# Altium footprint library WR-RAST.PcbLib: 73 footprints (part 4 of 5)
Each footprint in its own frame and in the unit in brackets; x right, y up, seen from the top. Pads: shape width x height; smd on the part's side, far side on the other; paste and mask are expansions set on the pad; w line width, h text height; cw(c..) or ccw(c..) is an arc to the next point about the centre after c.
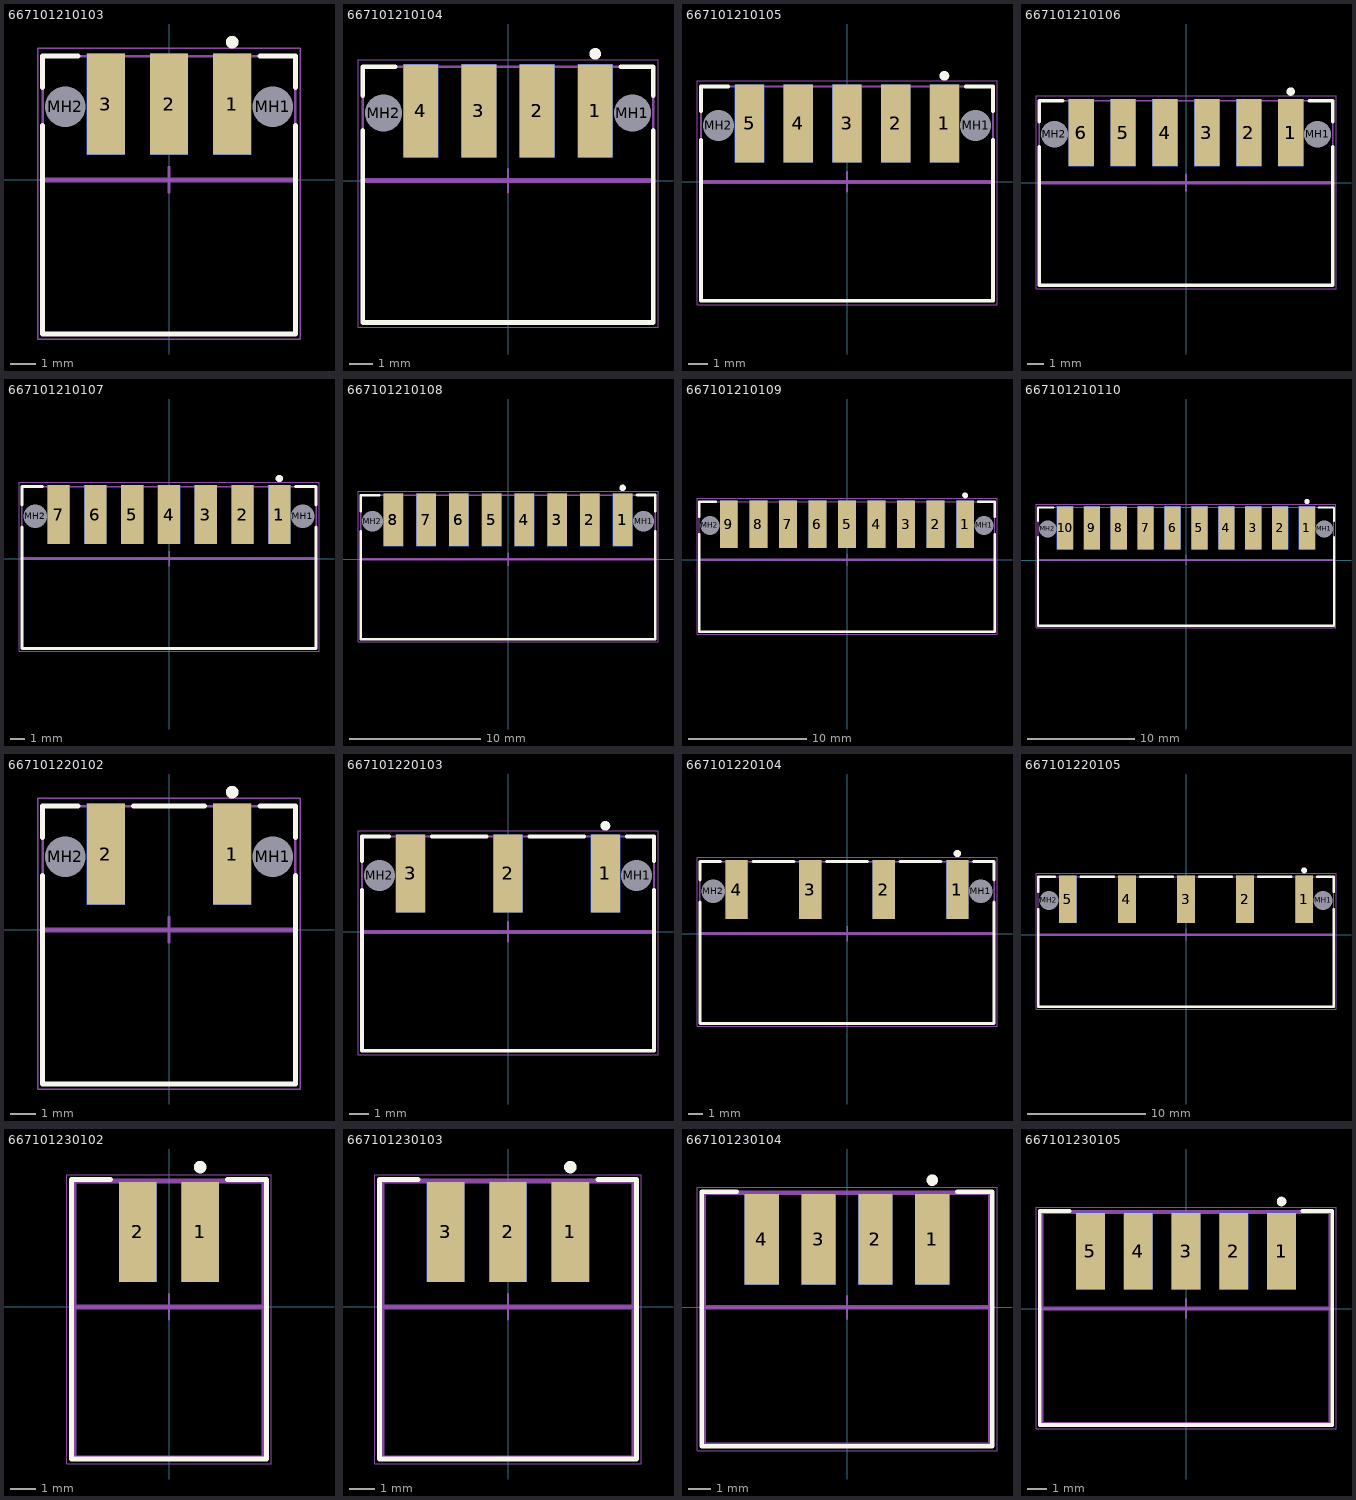
[diagram p3: the footprints below, top view; thin cyan lines are the x and y axes]

## 667101210103 [mm] "RAST Housing 2.5mm Pitch for Direct or Indirect Mating with lockign features, 3p"
height 7.35
pads (8):
  rect 1.5x4 smd: 1(2.5,3) 2(0,3) 3(-2.5,3)
  rect 1.5x4 smd far side: 1(2.5,3) 2(0,3) 3(-2.5,3)
  round 1.5 hole 1.6 unplated: MH1(4.1,2.9) MH2(-4.1,2.9)
Top Overlay:
  circle w0.25: c2.5,5.45 r0.125
  lines w0.2: -5,2.15 -5,-6.1 5,-6.1 5,2.15 ; -5,3.65 -5,4.9 -3.6,4.9 ; 3.6,4.9 5,4.9 5,3.65
Assembly Notes:
  lines w0.2: -5,0 5,0
  text "PCB Edge" at -2.443,-1.378 h1.2
Top Assembly:
  lines w0.1: -5,-6.1 -5,4.9 5,4.9 5,-6.1 -5,-6.1
Top Designator:
  text ".Designator" at -3.647,-0.357 h1
Top 3D Body:
  lines w0.1: -5,-6.1 -5,4.9 5,4.9 5,-6.1 -5,-6.1
Top Courtyard:
  lines w0.05: -5.2,-6.3 5.2,-6.3 5.2,5.2 -5.2,5.2 -5.2,-6.3
Top Component Center:
  lines w0.1: -0.5,0 0.5,0 ; 0,-0.5 0,0.5
3D body "667101210103.stp": height 3.17, standoff -4.17, extent -5,-6.1 5,4.9

## 667101210104 [mm] "RAST Housing 2.5mm Pitch for Direct or Indirect Mating with lockign features, 4p"
height 7.35
pads (10):
  rect 1.5x4 smd: 1(3.75,3) 2(1.25,3) 3(-1.25,3) 4(-3.75,3)
  rect 1.5x4 smd far side: 1(3.75,3) 2(1.25,3) 3(-1.25,3) 4(-3.75,3)
  round 1.5 hole 1.6 unplated: MH1(5.35,2.9) MH2(-5.35,2.9)
Top Overlay:
  circle w0.25: c3.75,5.45 r0.125
  lines w0.2: -6.25,2.15 -6.25,-6.1 6.25,-6.1 6.25,2.15 ; -6.25,3.65 -6.25,4.9 -4.85,4.9 ; 4.85,4.9 6.25,4.9 6.25,3.65
Assembly Notes:
  lines w0.2: -6.25,0 6.25,0
  text "PCB Edge" at -2.443,-1.378 h1.2
Top Assembly:
  lines w0.1: -6.25,-6.1 6.25,-6.1 6.25,4.9 -6.25,4.9 -6.25,-6.1
Top Designator:
  text ".Designator" at -3.647,-0.357 h1
Top 3D Body:
  lines w0.1: -6.25,-6.1 6.25,-6.1 6.25,4.9 -6.25,4.9 -6.25,-6.1
Top Courtyard:
  lines w0.05: -6.45,-6.3 -6.45,5.2 6.45,5.2 6.45,-6.3 -6.45,-6.3
Top Component Center:
  lines w0.1: -0.5,0 0.5,0 ; 0,-0.5 0,0.5
3D body "667101210104.stp": height 3.17, standoff -4.17, extent -6.25,-6.1 6.25,4.9

## 667101210105 [mm] "RAST Housing 2.5mm Pitch for Direct or Indirect Mating with lockign features, 5p"
height 7.35
pads (12):
  rect 1.5x4 smd: 1(5,3) 2(2.5,3) 3(0,3) 4(-2.5,3) 5(-5,3)
  rect 1.5x4 smd far side: 1(5,3) 2(2.5,3) 3(0,3) 4(-2.5,3) 5(-5,3)
  round 1.5 hole 1.6 unplated: MH1(6.6,2.9) MH2(-6.6,2.9)
Top Overlay:
  circle w0.25: c5,5.45 r0.125
  lines w0.2: -7.5,2.15 -7.5,-6.1 7.5,-6.1 7.5,2.15 ; -7.5,3.65 -7.5,4.9 -6.1,4.9 ; 6.1,4.9 7.5,4.9 7.5,3.65
Assembly Notes:
  lines w0.2: -7.5,0 7.5,0
  text "PCB Edge" at -2.443,-1.378 h1.2
Top Assembly:
  lines w0.1: 7.5,-6.1 -7.5,-6.1 -7.5,4.9 7.5,4.9 ; 7.5,-6.1 7.5,4.9
Top Designator:
  text ".Designator" at -3.647,-0.357 h1
Top 3D Body:
  lines w0.1: 7.5,-6.1 -7.5,-6.1 -7.5,4.9 7.5,4.9 ; 7.5,-6.1 7.5,4.9
Top Courtyard:
  lines w0.05: -7.7,-6.3 7.7,-6.3 7.7,5.2 -7.7,5.2 -7.7,-6.3
Top Component Center:
  lines w0.1: -0.5,0 0.5,0 ; 0,-0.5 0,0.5
3D body "667101210105.stp": height 3.17, standoff -4.17, extent -7.5,-6.1 7.5,4.9

## 667101210106 [mm] "RAST Housing 2.5mm Pitch for Direct or Indirect Mating with lockign features, 6p"
height 7.35
pads (14):
  rect 1.5x4 smd: 1(6.25,3) 2(3.75,3) 3(1.25,3) 4(-1.25,3) 5(-3.75,3) 6(-6.25,3)
  rect 1.5x4 smd far side: 1(6.25,3) 2(3.75,3) 3(1.25,3) 4(-1.25,3) 5(-3.75,3) 6(-6.25,3)
  round 1.5 hole 1.6 unplated: MH1(7.85,2.9) MH2(-7.85,2.9)
Top Overlay:
  circle w0.25: c6.25,5.45 r0.125
  lines w0.2: -8.75,2.15 -8.75,-6.1 8.75,-6.1 8.75,2.15 ; -8.75,3.65 -8.75,4.9 -7.35,4.9 ; 7.35,4.9 8.75,4.9 8.75,3.65
Assembly Notes:
  lines w0.2: -8.75,0 8.75,0
  text "PCB Edge" at -2.443,-1.378 h1.2
Top Assembly:
  lines w0.1: -8.75,-6.1 -8.75,4.9 8.75,4.9 8.75,-6.1 -8.75,-6.1
Top Designator:
  text ".Designator" at -3.647,-0.357 h1
Top 3D Body:
  lines w0.1: -8.75,-6.1 -8.75,4.9 8.75,4.9 8.75,-6.1 -8.75,-6.1
Top Courtyard:
  lines w0.05: -8.95,-6.3 8.95,-6.3 8.95,5.2 -8.95,5.2 -8.95,-6.3
Top Component Center:
  lines w0.1: -0.5,0 0.5,0 ; 0,-0.5 0,0.5
3D body "667101210106.stp": height 3.42, standoff -3.92, extent -8.75,-6.1 8.75,4.9

## 667101210107 [mm] "RAST Housing 2.5mm Pitch for Direct or Indirect Mating with lockign features, 7p"
height 7.35
pads (16):
  rect 1.5x4 smd: 1(7.5,3) 2(5,3) 3(2.5,3) 4(0,3) 5(-2.5,3) 6(-5,3) 7(-7.5,3)
  rect 1.5x4 smd far side: 1(7.5,3) 2(5,3) 3(2.5,3) 4(0,3) 5(-2.5,3) 6(-5,3) 7(-7.5,3)
  round 1.5 hole 1.6 unplated: MH1(9.1,2.9) MH2(-9.1,2.9)
Top Overlay:
  circle w0.25: c7.5,5.45 r0.125
  lines w0.2: -10,2.15 -10,-6.1 10,-6.1 10,2.15 ; -10,3.65 -10,4.9 -8.6,4.9 ; 8.6,4.9 10,4.9 10,3.65
Assembly Notes:
  lines w0.2: -10,0 10,0
  text "PCB Edge" at -2.443,-1.378 h1.2
Top Assembly:
  lines w0.1: -10,-6.1 10,-6.1 10,4.9 -10,4.9 -10,-6.1
Top Designator:
  text ".Designator" at -3.647,-0.357 h1
Top 3D Body:
  lines w0.1: -10,-6.1 10,-6.1 10,4.9 -10,4.9 -10,-6.1
Top Courtyard:
  lines w0.05: -10.2,-6.3 -10.2,5.2 10.2,5.2 10.2,-6.3 -10.2,-6.3
Top Component Center:
  lines w0.1: -0.5,0 0.5,0 ; 0,-0.5 0,0.5
3D body "667101210107.stp": height 3.42, standoff -3.92, extent -10,-6.1 10,4.9

## 667101210108 [mm] "RAST Housing 2.5mm Pitch for Direct or Indirect Mating with lockign features, 8p"
height 7.35
pads (18):
  rect 1.5x4 smd: 1(8.75,3) 2(6.25,3) 3(3.75,3) 4(1.25,3) 5(-1.25,3) 6(-3.75,3) 7(-6.25,3) 8(-8.75,3)
  rect 1.5x4 smd far side: 1(8.75,3) 2(6.25,3) 3(3.75,3) 4(1.25,3) 5(-1.25,3) 6(-3.75,3) 7(-6.25,3) 8(-8.75,3)
  round 1.5 hole 1.6 unplated: MH1(10.35,2.9) MH2(-10.35,2.9)
Top Overlay:
  circle w0.25: c8.75,5.45 r0.125
  lines w0.2: -11.25,2.15 -11.25,-6.1 11.25,-6.1 11.25,2.15 ; -11.25,3.65 -11.25,4.9 -9.85,4.9 ; 9.85,4.9 11.25,4.9 11.25,3.65
Assembly Notes:
  lines w0.2: -11.25,0 11.25,0
  text "PCB Edge" at -2.443,-1.378 h1.2
Top Assembly:
  lines w0.1: -11.25,-6.1 11.25,-6.1 11.25,4.9 -11.25,4.9 -11.25,-6.1
Top Designator:
  text ".Designator" at -3.647,-0.357 h1
Top 3D Body:
  lines w0.1: -11.25,-6.1 11.25,-6.1 11.25,4.9 -11.25,4.9 -11.25,-6.1
Top Courtyard:
  lines w0.05: -11.45,-6.3 -11.45,5.2 11.45,5.2 11.45,-6.3 -11.45,-6.3
Top Component Center:
  lines w0.1: -0.5,0 0.5,0 ; 0,-0.5 0,0.5
3D body "667101210108.stp": height 3.42, standoff -3.92, extent -11.25,-6.1 11.25,4.9

## 667101210109 [mm] "RAST Housing 2.5mm Pitch for Direct or Indirect Mating with lockign features, 9p"
height 7.35
pads (20):
  rect 1.5x4 smd: 1(10,3) 2(7.5,3) 3(5,3) 4(2.5,3) 5(0,3) 6(-2.5,3) 7(-5,3) 8(-7.5,3) 9(-10,3)
  rect 1.5x4 smd far side: 1(10,3) 2(7.5,3) 3(5,3) 4(2.5,3) 5(0,3) 6(-2.5,3) 7(-5,3) 8(-7.5,3) 9(-10,3)
  round 1.5 hole 1.6 unplated: MH1(11.6,2.9) MH2(-11.6,2.9)
Top Overlay:
  circle w0.25: c10,5.45 r0.125
  lines w0.2: -12.5,2.15 -12.5,-6.1 12.5,-6.1 12.5,2.15 ; -12.5,3.65 -12.5,4.9 -11.1,4.9 ; 11.1,4.9 12.5,4.9 12.5,3.65
Assembly Notes:
  lines w0.2: -12.5,0 12.5,0
  text "PCB Edge" at -2.443,-1.378 h1.2
Top Assembly:
  lines w0.1: 12.5,-6.1 -12.5,-6.1 -12.5,4.9 12.5,4.9 ; 12.5,-6.1 12.5,4.9
Top Designator:
  text ".Designator" at -3.647,-0.357 h1
Top 3D Body:
  lines w0.1: 12.5,-6.1 -12.5,-6.1 -12.5,4.9 12.5,4.9 ; 12.5,-6.1 12.5,4.9
Top Courtyard:
  lines w0.05: -12.7,-6.3 12.7,-6.3 12.7,5.2 -12.7,5.2 -12.7,-6.3
Top Component Center:
  lines w0.1: -0.5,0 0.5,0 ; 0,-0.5 0,0.5
3D body "667101210109.stp": height 3.42, standoff -3.92, extent -12.5,-6.1 12.5,4.9

## 667101210110 [mm] "RAST Housing 2.5mm Pitch for Direct or Indirect Mating with lockign features, 10p"
height 7.35
pads (22):
  rect 1.5x4 smd: 1(11.25,3) 2(8.75,3) 3(6.25,3) 4(3.75,3) 5(1.25,3) 6(-1.25,3) 7(-3.75,3) 8(-6.25,3) 9(-8.75,3) 10(-11.25,3)
  rect 1.5x4 smd far side: 1(11.25,3) 2(8.75,3) 3(6.25,3) 4(3.75,3) 5(1.25,3) 6(-1.25,3) 7(-3.75,3) 8(-6.25,3) 9(-8.75,3) 10(-11.25,3)
  round 1.5 hole 1.6 unplated: MH1(12.85,2.9) MH2(-12.85,2.9)
Top Overlay:
  circle w0.25: c11.25,5.45 r0.125
  lines w0.2: -13.75,2.15 -13.75,-6.1 13.75,-6.1 13.75,2.15 ; -13.75,3.65 -13.75,4.9 -12.35,4.9 ; 12.35,4.9 13.75,4.9 13.75,3.65
Assembly Notes:
  lines w0.2: -13.75,0 13.75,0
  text "PCB Edge" at -2.443,-1.378 h1.2
Top Assembly:
  lines w0.1: -13.75,-6.1 -13.75,4.9 13.75,4.9 13.75,-6.1 -13.75,-6.1
Top Designator:
  text ".Designator" at -3.647,-0.357 h1
Top 3D Body:
  lines w0.1: -13.75,-6.1 -13.75,4.9 13.75,4.9 13.75,-6.1 -13.75,-6.1
Top Courtyard:
  lines w0.05: -13.95,-6.3 13.95,-6.3 13.95,5.2 -13.95,5.2 -13.95,-6.3
Top Component Center:
  lines w0.1: -0.5,0 0.5,0 ; 0,-0.5 0,0.5
3D body "667101210110.stp": height 3.42, standoff -3.92, extent -13.75,-6.1 13.75,4.9

## 667101220102 [mm] "RAST Housing 5mm Pitch for Direct or Indirect Mating with lockign features, 2p"
height 7.35
pads (6):
  rect 1.5x4 smd: 1(2.5,3) 2(-2.5,3)
  rect 1.5x4 smd far side: 1(2.5,3) 2(-2.5,3)
  round 1.5 hole 1.6 unplated: MH1(4.1,2.9) MH2(-4.1,2.9)
Top Overlay:
  circle w0.25: c2.5,5.45 r0.125
  lines w0.2: -5,2.15 -5,-6.1 5,-6.1 5,2.15 ; -5,3.65 -5,4.9 -3.6,4.9 ; -1.4,4.9 1.4,4.9 ; 3.6,4.9 5,4.9 5,3.65
Assembly Notes:
  lines w0.2: -5,0 5,0
  text "PCB Edge" at -2.443,-1.378 h1.2
Top Assembly:
  lines w0.1: -5,-6.1 5,-6.1 5,4.9 -5,4.9 -5,-6.1
Top Designator:
  text ".Designator" at -3.647,-0.357 h1
Top 3D Body:
  lines w0.1: -5,-6.1 5,-6.1 5,4.9 -5,4.9 -5,-6.1
Top Courtyard:
  lines w0.05: -5.2,-6.3 -5.2,5.2 5.2,5.2 5.2,-6.3 -5.2,-6.3
Top Component Center:
  lines w0.1: -0.5,0 0.5,0 ; 0,-0.5 0,0.5
3D body "667101220102.stp": height 3.42, standoff -3.92, extent -5,-6.1 5,4.9

## 667101220103 [mm] "RAST Housing 5mm Pitch for Direct or Indirect Mating with lockign features, 3p"
height 7.35
pads (8):
  rect 1.5x4 smd: 1(5,3) 2(0,3) 3(-5,3)
  rect 1.5x4 smd far side: 1(5,3) 2(0,3) 3(-5,3)
  round 1.5 hole 1.6 unplated: MH1(6.6,2.9) MH2(-6.6,2.9)
Top Overlay:
  circle w0.25: c5,5.45 r0.125
  lines w0.2: -7.5,3.65 -7.5,4.9 -6.1,4.9 ; -7.5,2.15 -7.5,-6.1 7.5,-6.1 7.5,2.15 ; -3.9,4.9 -1.1,4.9 ; 1.1,4.9 3.9,4.9 ; 6.1,4.9 7.5,4.9 7.5,3.65
Assembly Notes:
  lines w0.2: -7.5,0 7.5,0
  text "PCB Edge" at -2.443,-1.378 h1.2
Top Assembly:
  lines w0.1: -7.5,-6.1 7.5,-6.1 7.5,4.9 -7.5,4.9 -7.5,-6.1
Top Designator:
  text ".Designator" at -3.647,-0.357 h1
Top 3D Body:
  lines w0.1: -7.5,-6.1 7.5,-6.1 7.5,4.9 -7.5,4.9 -7.5,-6.1
Top Courtyard:
  lines w0.05: -7.7,-6.3 -7.7,5.2 7.7,5.2 7.7,-6.3 -7.7,-6.3
Top Component Center:
  lines w0.1: -0.5,0 0.5,0 ; 0,-0.5 0,0.5
3D body "667101220103.stp": height 3.42, standoff -3.92, extent -7.5,-6.1 7.5,4.9

## 667101220104 [mm] "RAST Housing 5mm Pitch for Direct or Indirect Mating with lockign features, 4p"
height 7.35
pads (10):
  rect 1.5x4 smd: 1(7.5,3) 2(2.5,3) 3(-2.5,3) 4(-7.5,3)
  rect 1.5x4 smd far side: 1(7.5,3) 2(2.5,3) 3(-2.5,3) 4(-7.5,3)
  round 1.5 hole 1.6 unplated: MH1(9.1,2.9) MH2(-9.1,2.9)
Top Overlay:
  circle w0.25: c7.5,5.45 r0.125
  lines w0.2: -10,2.15 -10,-6.1 10,-6.1 10,2.15 ; -10,3.65 -10,4.9 -8.6,4.9 ; -6.4,4.9 -3.6,4.9 ; -1.4,4.9 1.4,4.9 ; 3.6,4.9 6.4,4.9 ; 8.6,4.9 10,4.9 10,3.65
Assembly Notes:
  lines w0.2: -10,0 10,0
  text "PCB Edge" at -2.443,-1.378 h1.2
Top Assembly:
  lines w0.1: -10,-6.1 -10,4.9 10,4.9 10,-6.1 -10,-6.1
Top Designator:
  text ".Designator" at -3.647,-0.357 h1
Top 3D Body:
  lines w0.1: -10,-6.1 -10,4.9 10,4.9 10,-6.1 -10,-6.1
Top Courtyard:
  lines w0.05: -10.2,-6.3 10.2,-6.3 10.2,5.2 -10.2,5.2 -10.2,-6.3
Top Component Center:
  lines w0.1: -0.5,0 0.5,0 ; 0,-0.5 0,0.5
3D body "667101220104.stp": height 3.42, standoff -3.92, extent -10,-6.1 10,4.9

## 667101220105 [mm] "RAST Housing 5mm Pitch for Direct or Indirect Mating with lockign features, 5p"
height 7.35
pads (12):
  rect 1.5x4 smd: 1(10,3) 2(5,3) 3(0,3) 4(-5,3) 5(-10,3)
  rect 1.5x4 smd far side: 1(10,3) 2(5,3) 3(0,3) 4(-5,3) 5(-10,3)
  round 1.5 hole 1.6 unplated: MH1(11.6,2.9) MH2(-11.6,2.9)
Top Overlay:
  circle w0.25: c10,5.45 r0.125
  lines w0.2: -12.5,3.65 -12.5,4.9 -11.1,4.9 ; -12.5,2.15 -12.5,-6.1 12.5,-6.1 12.5,2.15 ; -8.9,4.9 -6.1,4.9 ; -3.9,4.9 -1.1,4.9 ; 1.1,4.9 3.9,4.9 ; 6.1,4.9 8.9,4.9 ; 11.1,4.9 12.5,4.9 12.5,3.65
Assembly Notes:
  lines w0.2: -12.5,0 12.5,0
  text "PCB Edge" at -2.443,-1.378 h1.2
Top Assembly:
  lines w0.1: -12.5,-6.1 12.5,-6.1 12.5,4.9 -12.5,4.9 -12.5,-6.1
Top Designator:
  text ".Designator" at -3.647,-0.357 h1
Top 3D Body:
  lines w0.1: -12.5,-6.1 12.5,-6.1 12.5,4.9 -12.5,4.9 -12.5,-6.1
Top Courtyard:
  lines w0.05: -12.7,-6.3 -12.7,5.2 12.7,5.2 12.7,-6.3 -12.7,-6.3
Top Component Center:
  lines w0.1: -0.5,0 0.5,0 ; 0,-0.5 0,0.5
3D body "667101220105.stp": height 3.42, standoff -3.92, extent -12.5,-6.1 12.5,4.9

## 667101230102 [mm] "RAST 2.5 Housing 2.5mm Pitch for Direct or Indirect Mating without locking features， 02p"
height 7.35
pads (4):
  rect 1.5x4 smd: 1(1.25,3) 2(-1.25,3)
  rect 1.5x4 smd far side: 1(1.25,3) 2(-1.25,3)
Top Overlay:
  circle w0.25: c1.25,5.6 r0.125
  lines w0.2: -2.35,5.1 -3.9,5.1 -3.9,-6.1 3.9,-6.1 3.9,5.1 2.35,5.1
Assembly Notes:
  lines w0.2: -3.9,0 3.9,0
  text "PCB Edge" at -1.834,-1.082 h1
Top Assembly:
  lines w0.1: -3.9,-6.1 -3.9,5.1 3.9,5.1 3.9,-6.1 -3.9,-6.1
Top Designator:
  text ".Designator" at -3.647,-0.357 h1
Top 3D Body:
  lines w0.1: -3.75,-6 -3.75,5 3.75,5 3.75,-6 -3.75,-6
Top Courtyard:
  lines w0.05: -4.1,-6.3 -4.1,5.3 4.1,5.3 4.1,-6.3 -4.1,-6.3
Top Component Center:
  lines w0.1: -0.5,0 0.5,0 ; 0,-0.5 0,0.5
3D body "667101230102.stp": height 3.22, standoff -4.12, extent -3.75,-6 3.75,5

## 667101230103 [mm] "RAST 2.5 Housing 2.5mm Pitch for Direct or Indirect Mating without locking features， 03p"
height 7.35
pads (6):
  rect 1.5x4 smd far side: 1(2.5,3) 2(0,3) 3(-2.5,3)
  rect 1.5x4 smd: 1(2.5,3) 2(0,3) 3(-2.5,3)
Top Overlay:
  circle w0.25: c2.5,5.6 r0.125
  lines w0.2: -3.6,5.1 -5.15,5.1 -5.15,-6.1 5.15,-6.1 5.15,5.1 3.6,5.1
Assembly Notes:
  lines w0.2: -5.15,0 5.15,0
  text "PCB Edge" at -2.034,-1.082 h1
Top Assembly:
  lines w0.1: -5.15,-6.1 -5.15,5.1 5.15,5.1 5.15,-6.1 -5.15,-6.1
Top Designator:
  text ".Designator" at -3.647,-0.357 h1
Top 3D Body:
  lines w0.1: -5,-6 -5,5 5,5 5,-6 -5,-6
Top Courtyard:
  lines w0.05: -5.35,-6.3 -5.35,5.3 5.35,5.3 5.35,-6.3 -5.35,-6.3
Top Component Center:
  lines w0.1: -0.5,0 0.5,0 ; 0,-0.5 0,0.5
3D body "667101230103.stp": height 3.22, standoff -4.12, extent -5,-6 5,5

## 667101230104 [mm] "RAST 2.5 Housing 2.5mm Pitch for Direct or Indirect Mating without locking features， 04p"
height 7.35
pads (8):
  rect 1.5x4 smd: 1(3.75,3) 2(1.25,3) 3(-1.25,3) 4(-3.75,3)
  rect 1.5x4 smd far side: 1(3.75,3) 2(1.25,3) 3(-1.25,3) 4(-3.75,3)
Top Overlay:
  circle w0.25: c3.75,5.6 r0.125
  lines w0.2: -4.85,5.1 -6.4,5.1 -6.4,-6.1 6.4,-6.1 6.4,5.1 4.85,5.1
Assembly Notes:
  lines w0.2: -6.4,0 6.4,0
  text "PCB Edge" at -2.034,-1.082 h1
Top Assembly:
  lines w0.1: -6.4,-6.1 -6.4,5.1 6.4,5.1 6.4,-6.1 -6.4,-6.1
Top Designator:
  text ".Designator" at -3.647,-0.357 h1
Top 3D Body:
  lines w0.1: -6.25,-6 -6.25,5 6.25,5 6.25,-6 -6.25,-6
Top Courtyard:
  lines w0.05: -6.6,-6.3 -6.6,5.3 6.6,5.3 6.6,-6.3 -6.6,-6.3
Top Component Center:
  lines w0.1: -0.5,0 0.5,0 ; 0,-0.5 0,0.5
3D body "667101230104.stp": height 3.22, standoff -4.12, extent -6.25,-6 6.25,5

## 667101230105 [mm] "RAST 2.5 Housing 2.5mm Pitch for Direct or Indirect Mating without locking features， 05p"
height 7.35
pads (10):
  rect 1.5x4 smd far side: 1(5,3) 2(2.5,3) 3(0,3) 4(-2.5,3) 5(-5,3)
  rect 1.5x4 smd: 1(5,3) 2(2.5,3) 3(0,3) 4(-2.5,3) 5(-5,3)
Top Overlay:
  circle w0.25: c5,5.6 r0.125
  lines w0.2: -6.1,5.1 -7.65,5.1 -7.65,-6.1 7.65,-6.1 7.65,5.1 6.1,5.1
Assembly Notes:
  lines w0.2: -7.65,0 7.65,0
  text "PCB Edge" at -2.034,-1.082 h1
Top Assembly:
  lines w0.1: -7.65,-6.1 -7.65,5.1 7.65,5.1 7.65,-6.1 -7.65,-6.1
Top Designator:
  text ".Designator" at -3.647,-0.357 h1
Top 3D Body:
  lines w0.1: -7.5,-6 -7.5,5 7.5,5 7.5,-6 -7.5,-6
Top Courtyard:
  lines w0.05: -7.85,-6.3 -7.85,5.3 7.85,5.3 7.85,-6.3 -7.85,-6.3
Top Component Center:
  lines w0.1: -0.5,0 0.5,0 ; 0,-0.5 0,0.5
3D body "667101230105.stp": height 3.22, standoff -4.12, extent -7.5,-6 7.5,5